# Altium footprint library Footprint.PcbLib: 411 footprints (part 13 of 26)
Each footprint in its own frame and in the unit in brackets; x right, y up, seen from the top. Pads: shape width x height; smd on the part's side, far side on the other; paste and mask are expansions set on the pad; w line width, h text height; cw(c..) or ccw(c..) is an arc to the next point about the centre after c.
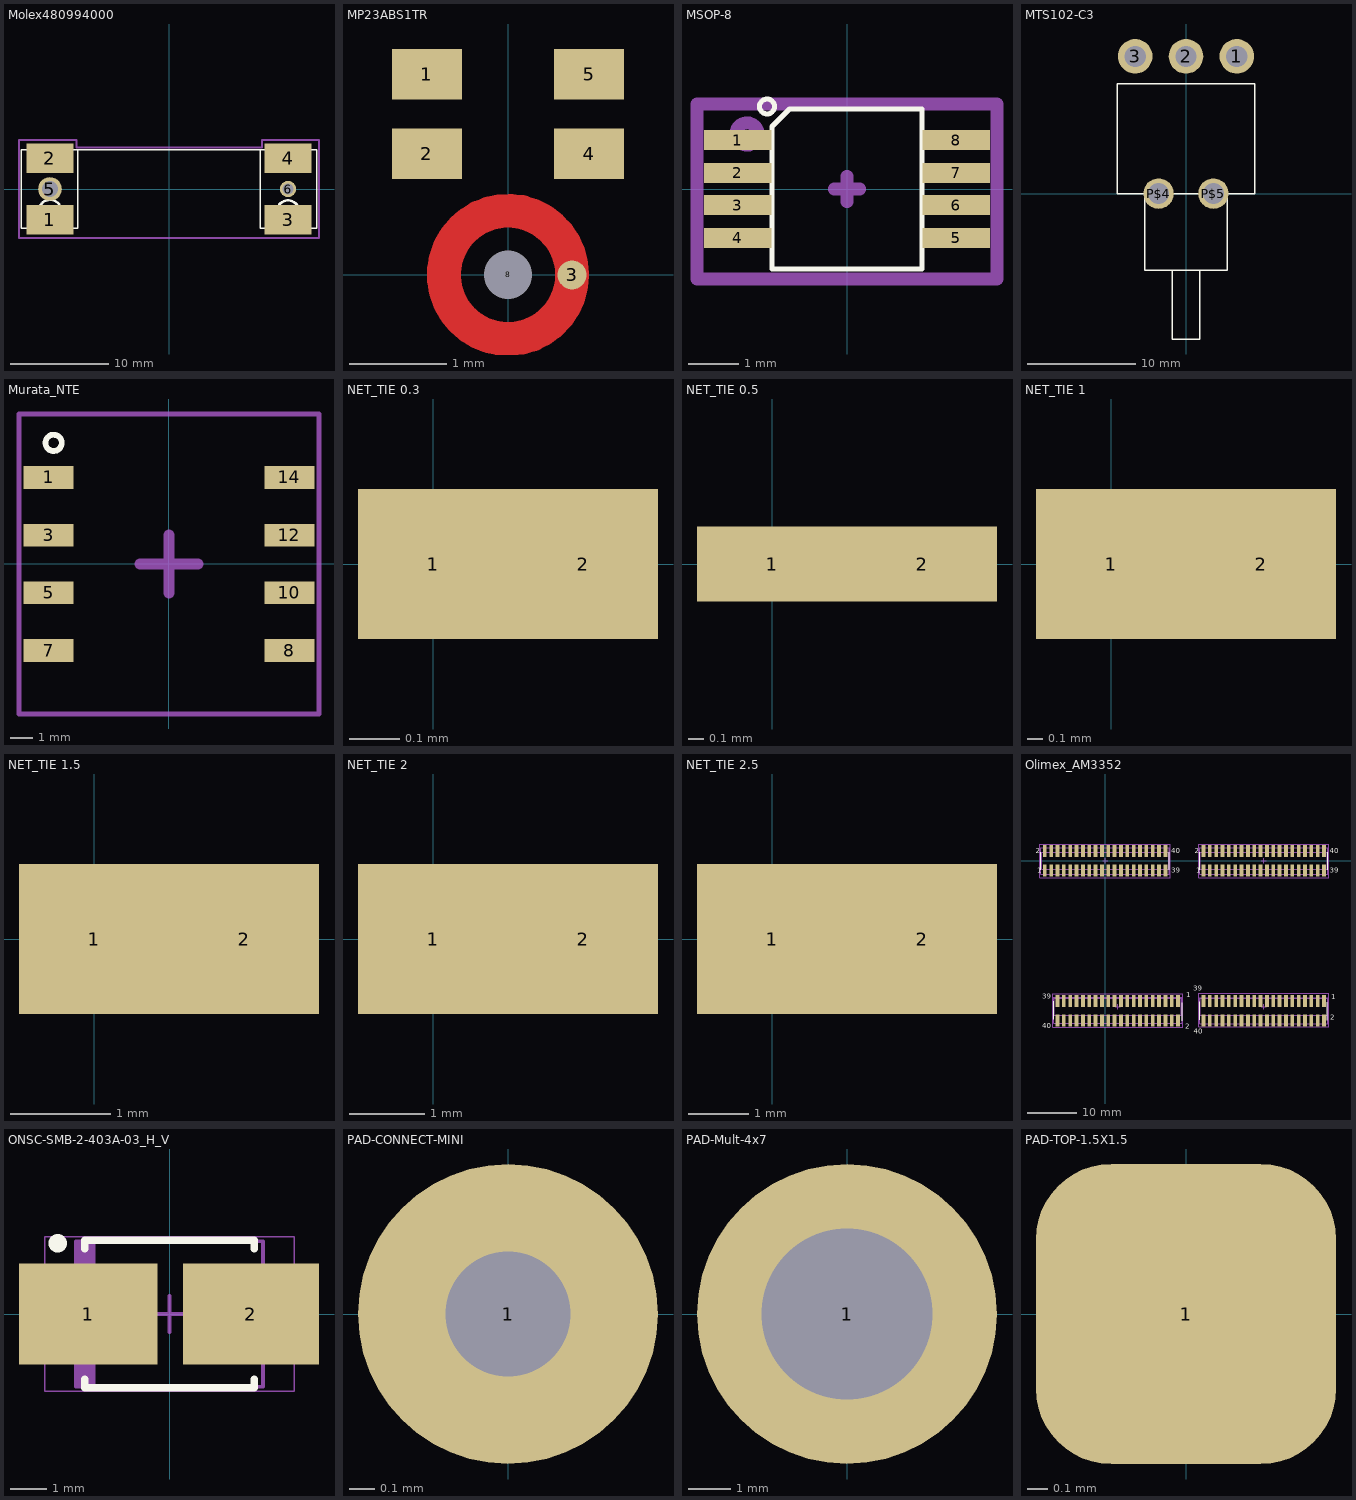
[diagram p12: the footprints below, top view; thin cyan lines are the x and y axes]

## Molex480994000 [mm]
pads (6):
  rect 4.8x3 smd: 1(-12.1,-3.15) 2(-12.1,3.15) 3(12.1,-3.15) 4(12.1,3.15)
  round 2.4 hole 1.6: 5(-12.1,0)
  round 1.65 hole 1.1: 6(12.1,0)
Top Overlay:
  circle w0.254: c12.1,-2.25 r1.1
  circle w0.254: c-12.1,-2.25 r1.15
  lines w0.152: -15,-3.975 -15,3.975 ; -15,-3.975 -15,3.975 ; -15,-3.975 -9.27,-3.975 ; -15,-3.975 -9.27,-3.975 ; -15,3.975 -9.27,3.975 ; -15,3.975 -9.27,3.975 ; -9.27,-3.975 -9.27,3.975 ; -9.27,-3.975 -9.27,3.975 ; -9.27,3.975 9.27,3.975 ; -9.27,3.975 9.27,3.975 ; 9.27,-3.975 9.27,3.975 ; 9.27,-3.975 9.27,3.975 ; 9.27,-3.975 15,-3.975 ; 9.27,-3.975 15,-3.975 ; 9.27,3.975 15,3.975 ; 9.27,3.975 15,3.975 ; 15,-3.975 15,3.975 ; 15,-3.975 15,3.975
Mechanical 15:
  lines w0.2: -15.25,-5 -15.25,5 -9.425,5 -9.425,4.225 9.45,4.225 9.45,5 15.25,5 15.25,-5 -15.25,-5
3D body "480994000.stp": height 4.85, standoff -0.7, extent -14.225,-4.229 14.225,5.131

## MP23ABS1TR [mm]
pads (6):
  rect 0.725x0.522 smd: 1(-0.838,2.074) 2(-0.838,1.252) 4(0.838,1.252) 5(0.838,2.074)
  round 0.3 smd: 3(0.663,0)
  round 0.1 hole 0.5 unplated: 8(0,0)
Top Layer:
  circle w0.35: c0,0 r0.663

## MSOP-8 [mm]
pads (8):
  rect 1.35x0.4 smd: 1(-2.188,0.975) 2(-2.188,0.325) 3(-2.188,-0.325) 4(-2.188,-0.975) 6(2.188,-0.325) 7(2.188,0.325) 8(2.188,0.975)
  rect 1.35x0.4 smd mask+0.1: 5(2.188,-0.975)
Top Overlay:
  circle w0.1: c-1.6,1.65 r0.15
  lines w0.1: -1.5,-1.6 1.5,-1.6 1.5,1.6 -1.15,1.6 -1.5,1.25 -1.5,-1.6
Mechanical 15:
  circle w0.254: c-2,1.1 r0.224
  lines w0.254: -0.254,0 0.254,0 ; 0,-0.254 0,0.254 ; -3,-1.8 3,-1.8 3,1.7 -3,1.7 -3,-1.8
  text ".Designator" at -2.8,2 h1.52
3D body "User Library-MSOP-8-2.step": height 1.06, standoff -0.01, extent -2.498,-1.5 2.523,1.5

## MTS102-C3 [mm]
pads (5):
  round 3.2 hole 1.95: 1(4.699,12.7) 2(0,12.7) 3(-4.699,12.7)
  round 2.819 hole 1.95: P$4(-2.54,0) P$5(2.54,0)
Top Overlay:
  lines w0.127: -3.81,0 -3.81,-7.112 -1.27,-7.112 ; -3.81,0 3.81,0 ; -3.81,0 -6.35,0 -6.35,10.16 6.35,10.16 6.35,0 3.81,0 ; -1.27,-7.112 -1.27,-13.462 1.27,-13.462 1.27,-7.112 ; -1.27,-7.112 1.27,-7.112 ; 1.27,-7.112 3.81,-7.112 3.81,0
3D body "100SP1T2B4M6QE--3DModel-STEP-520916.STEP": height 6.83, standoff -3.2, extent -6.35,-13.76 6.35,13.39

## Murata_NTE [mm]
pads (8):
  rect 2.2x1 smd: 1(-5.3,3.81) 3(-5.3,1.27) 5(-5.3,-1.27) 7(-5.3,-3.81) 8(5.3,-3.81) 10(5.3,-1.27) 12(5.3,1.27) 14(5.3,3.81)
Top Overlay:
  circle w0.254: c-5.08,5.334 r0.359
Mechanical 15:
  lines w0.2: -6.604,-6.604 6.604,-6.604 6.604,6.604 -6.604,6.604 -6.604,-6.604
  lines w0.5: -1.27,0 1.27,0 ; 0,-1.27 0,1.27
  text ".Designator" at -3.048,7.366 h1.52
3D body "User Library-NTE0303MC.STEP": height 6.35, standoff -0.25, extent -5.725,-6.35 5.725,6.347

## NET_TIE 0.3 [mm] "Net Tie 0.3mm width"
pads (2):
  rect 0.3x0.3 smd paste-10 mask-10: 1(0,0)
  rect 0.3x0.3 smd paste-60 mask-60: 2(0.3,0)

## NET_TIE 0.5 [mm] "Net Tie 0.5mm width"
pads (2):
  rect 1x0.5 smd paste-10 mask-10: 1(0,0) 2(1,0)

## NET_TIE 1 [mm] "Net Tie 1mm width"
pads (2):
  rect 1x1 smd paste-10 mask-10: 1(0,0)
  rect 1x1 smd paste-60 mask-60: 2(1,0)

## NET_TIE 1.5 [mm] "Net Tie 1.5mm width"
pads (2):
  rect 1.5x1.5 smd paste-10 mask-10: 1(0,0) 2(1.5,0)

## NET_TIE 2 [mm] "Net Tie 2mm width"
pads (2):
  rect 2x2 smd paste-10 mask-10: 1(0,0)
  rect 2x2 smd paste-60 mask-60: 2(2,0)

## NET_TIE 2.5 [mm] "Net Tie 2.5mm width"
pads (2):
  rect 2.5x2.5 smd paste-10 mask-10: 1(0,0)
  rect 2.5x2.5 smd paste-60 mask-60: 2(2.5,0)

## Olimex_AM3352 [mm]
pads (160):
  rect 0.75x2.4 smd: 1(43.815,-28) 2(43.815,-31.9) 3(42.545,-28) 4(42.545,-31.9) 5(41.275,-28) 6(41.275,-31.9) 7(40.005,-28) 8(40.005,-31.9) 9(38.735,-28) 10(38.735,-31.9) 11(37.465,-28) 12(37.465,-31.9) 13(36.195,-28) 14(36.195,-31.9) 15(34.925,-28) 16(34.925,-31.9) 17(33.655,-28) 18(33.655,-31.9) 19(32.385,-28) 20(32.385,-31.9) 21(31.115,-28) 22(31.115,-31.9) 23(29.845,-28) 24(29.845,-31.9) 25(28.575,-28) 26(28.575,-31.9) 27(27.305,-28) 28(27.305,-31.9) 29(26.035,-28) 30(26.035,-31.9) 31(24.765,-28) 32(24.765,-31.9) 33(23.495,-28) 34(23.495,-31.9) 35(22.225,-28) 36(22.225,-31.9) 37(20.955,-28) 38(20.955,-31.9) 39(19.685,-28) 40(19.685,-31.9) 41(14.605,-28) 42(14.605,-31.9) 43(13.335,-28) 44(13.335,-31.9) 45(12.065,-28) 46(12.065,-31.9) 47(10.795,-28) 48(10.795,-31.9) 49(9.525,-28) 50(9.525,-31.9) 51(8.255,-28) 52(8.255,-31.9) 53(6.985,-28) 54(6.985,-31.9) 55(5.715,-28) 56(5.715,-31.9) 57(4.445,-28) 58(4.445,-31.9) 59(3.175,-28) 60(3.175,-31.9) 61(1.905,-28) 62(1.905,-31.9) 63(0.635,-28) 64(0.635,-31.9) 65(-0.635,-28) 66(-0.635,-31.9) 67(-1.905,-28) 68(-1.905,-31.9) 69(-3.175,-28) 70(-3.175,-31.9) 71(-4.445,-28) 72(-4.445,-31.9) 73(-5.715,-28) 74(-5.715,-31.9) 75(-6.985,-28) 76(-6.985,-31.9) 77(-8.255,-28) 78(-8.255,-31.9) 79(-9.525,-28) 80(-9.525,-31.9) 81(-12.065,-1.95) 82(-12.065,1.95) 83(-10.795,-1.95) 84(-10.795,1.95) 85(-9.525,-1.95) 86(-9.525,1.95) 87(-8.255,-1.95) 88(-8.255,1.95) 89(-6.985,-1.95) 90(-6.985,1.95) 91(-5.715,-1.95) 92(-5.715,1.95) 93(-4.445,-1.95) 94(-4.445,1.95) 95(-3.175,-1.95) 96(-3.175,1.95) 97(-1.905,-1.95) 98(-1.905,1.95) 99(-0.635,-1.95) 100(-0.635,1.95) 101(0.635,-1.95) 102(0.635,1.95) 103(1.905,-1.95) 104(1.905,1.95) 105(3.175,-1.95) 106(3.175,1.95) 107(4.445,-1.95) 108(4.445,1.95) 109(5.715,-1.95) 110(5.715,1.95) 111(6.985,-1.95) 112(6.985,1.95) 113(8.255,-1.95) 114(8.255,1.95) 115(9.525,-1.95) 116(9.525,1.95) 117(10.795,-1.95) 118(10.795,1.95) 119(12.065,-1.95) 120(12.065,1.95) 121(19.685,-1.95) 122(19.685,1.95) 123(20.955,-1.95) 124(20.955,1.95) 125(22.225,-1.95) 126(22.225,1.95) 127(23.495,-1.95) 128(23.495,1.95) 129(24.765,-1.95) 130(24.765,1.95) 131(26.035,-1.95) 132(26.035,1.95) 133(27.305,-1.95) 134(27.305,1.95) 135(28.575,-1.95) 136(28.575,1.95) 137(29.845,-1.95) 138(29.845,1.95) 139(31.115,-1.95) 140(31.115,1.95) 141(32.385,-1.95) 142(32.385,1.95) 143(33.655,-1.95) 144(33.655,1.95) 145(34.925,-1.95) 146(34.925,1.95) 147(36.195,-1.95) 148(36.195,1.95) 149(37.465,-1.95) 150(37.465,1.95) 151(38.735,-1.95) 152(38.735,1.95) 153(40.005,-1.95) 154(40.005,1.95) 155(41.275,-1.95) 156(41.275,1.95) 157(42.545,-1.95) 158(42.545,1.95) 159(43.815,-1.95) 160(43.815,1.95)
Top Overlay:
  lines w0.2: -12.85,-1.775 -12.85,1.775 ; -10.3,-31.65 -10.3,-28.1 ; 12.85,-1.775 12.85,1.775 ; 15.4,-31.95 15.4,-28.4 ; 18.9,-31.75 18.9,-28.2 ; 18.9,-1.775 18.9,1.775 ; 44.5,-31.85 44.5,-28.3 ; 44.6,-1.775 44.6,1.775
  text "40" at 13.23,1.5 h1
  text "39" at 13.23,-2.4 h1
  text "2" at -13.83,1.5 h1
  text "1" at -13.53,-2.4 h1
  text "1" at 18.22,-2.4 h1
  text "2" at 17.92,1.5 h1
  text "39" at 44.98,-2.4 h1
  text "40" at 44.98,1.5 h1
  text "1" at 45.212,-27.686 h1
  text "2" at 45.085,-31.75 h1
  text "39" at 17.6,-26 h1
  text "40" at 17.7,-34.6 h1
  text "1" at 16.2,-27.3 h1
  text "2" at 16,-33.6 h1
  text "39" at -12.573,-27.559 h1
  text "40" at -12.6,-33.5 h1
Mechanical 11:
  lines w0.1: -12.7,-1.7 12.7,-1.7 12.7,1.7 -12.7,1.7 -12.7,-1.7 ; -10.16,-30.91 -10.16,-27.51 15.24,-27.51 15.24,-30.91 -10.16,-30.91 ; 19.05,-30.91 19.05,-27.51 44.6,-27.51 44.6,-30.91 19.05,-30.91 ; 19.05,-1.7 19.05,1.7 44.45,1.7 44.45,-1.7 19.05,-1.7
Mechanical 13:
  lines w0.1: -12.85,-2.625 -12.85,2.625 12.85,2.625 12.85,-2.625 -12.85,-2.625 ; -10.3,-32.535 15.4,-32.535 15.4,-27.285 -10.3,-27.285 -10.3,-32.535 ; 18.9,-32.635 44.6,-32.635 44.6,-27.385 18.9,-27.385 18.9,-32.635 ; 18.9,-2.625 44.6,-2.625 44.6,2.625 18.9,2.625 18.9,-2.625
Mechanical 15:
  lines w0.1: -0.5,0 0.5,0 ; 0,-0.5 0,0.5 ; 2.04,-29.21 3.04,-29.21 ; 2.54,-29.71 2.54,-28.71 ; 31.25,-29.21 32.25,-29.21 ; 31.25,0 32.25,0 ; 31.75,-29.71 31.75,-28.71 ; 31.75,-0.5 31.75,0.5 ; -13.05,-3.35 13.05,-3.35 13.05,3.35 -13.05,3.35 -13.05,-3.35 ; -10.51,-33.26 -10.51,-26.56 15.59,-26.56 15.59,-33.26 -10.51,-33.26 ; 18.7,-33.175 18.7,-26.475 44.8,-26.475 44.8,-33.175 18.7,-33.175 ; 18.7,-3.35 18.7,3.35 44.8,3.35 44.8,-3.35 18.7,-3.35
3D body "62104021021 (rev1).stp": height 5.9, standoff -0.01, extent 19.05,-2.5 44.45,2.5
3D body "62104021021 (rev1).stp": height 5.9, standoff -0.01, extent 19.05,-32.45 44.45,-27.45
3D body "62104021021 (rev1).stp": height 5.9, standoff -0.01, extent -10.16,-32.45 15.24,-27.45
3D body "62104021021 (rev1).stp": height 5.9, standoff -0.01, extent -12.7,-2.5 12.7,2.5

## ONSC-SMB-2-403A-03_H_V [mm] "Molded, 2-Leads, Body 4.6x3.95mm"
height 2.42
pads (2):
  rect 3.759x2.743 smd: 1(-2.21,0)
  rect 3.7x2.743 smd: 2(2.21,0)
Top Overlay:
  circle w0.25: c-3.04,1.921 r0.125
  lines w0.2: -2.3,-1.772 -2.3,-2 2.3,-2 2.3,-1.772 ; -2.3,1.772 -2.3,2 2.3,2 2.3,1.772
Mechanical 13:
  rectangle: -2.54,-1.975 -2.011,1.975
  lines w0.1: -2.54,-1.975 2.54,-1.975 2.54,1.975 -2.54,1.975 -2.54,-1.975
Mechanical 15:
  lines w0.05: -3.39,-2.1 3.39,-2.1 3.39,2.1 -3.39,2.1 -3.39,-2.1
  lines w0.1: -0.5,0 0.5,0 ; 0,-0.5 0,0.5
3D body: height 2.42, standoff 0, extent -2.54,-1.975 2.54,1.975

## PAD-CONNECT-MINI [mm]
pads (1):
  round 1.2 hole 0.5: 1(0,0)

## PAD-Mult-4x7 [mm]
pads (1):
  round 7 hole 4: 1(0,0)

## PAD-TOP-1.5X1.5 [mm]
pads (1):
  rrect50% 1.5x1.5 smd: 1(0,0)